# EAGLE library part HDR-2X3 (library rtd2660_board)
2 x 3 pin header 2.54 mm (jumper)
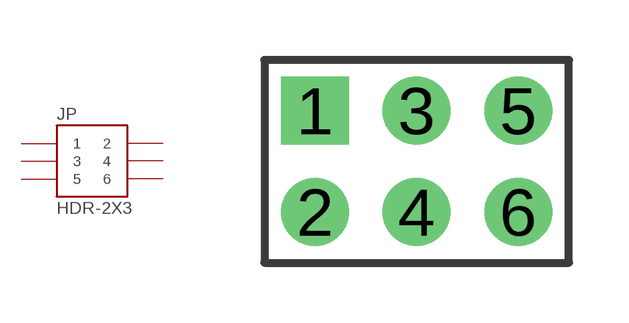
[diagram p7: symbol with the pads of HDR2X3-2.54; footprint HDR2X3-2.54]

Designator prefix JP

## HDR-2X3  [HDR2X3-2.54]
1  1  pas
2  2  pas
3  3  pas
4  4  pas
5  5  pas
6  6  pas

## Footprint HDR2X3-2.54 (pad centres in mm)
2 x 3 pin header, 2.54 mm pitch
drill 1 pad 1.7 square: 1 0,0
drill 1 pad 1.7 round: 2 0,-2.54; 3 2.54,0; 4 2.54,-2.54; 5 5.08,0; 6 5.08,-2.54